# EAGLE library part ESP32-S3-DEVKITC-1-N32R16V (library ESP32-S3-DevKitC-1-N32R16V)
Multiprotocol Development Tools The ESP32-S3-DevKitC-1 is an entry-level development board equipped with ESP32-S3-WROOM-1, ESP32-S3-WROOM-1U, or ESP32-S3-WROOM-2, a general-purpose Wi-Fi + Bluetooth Low Energy MCU module that integrates complete Wi-Fi and Bluetooth Low Energy funct Source: Datasheet <https://docs.espressif.com/projects/esp-dev-kits/en/latest/esp32s3/esp-dev-kits-en-master-esp32s3.pdf>
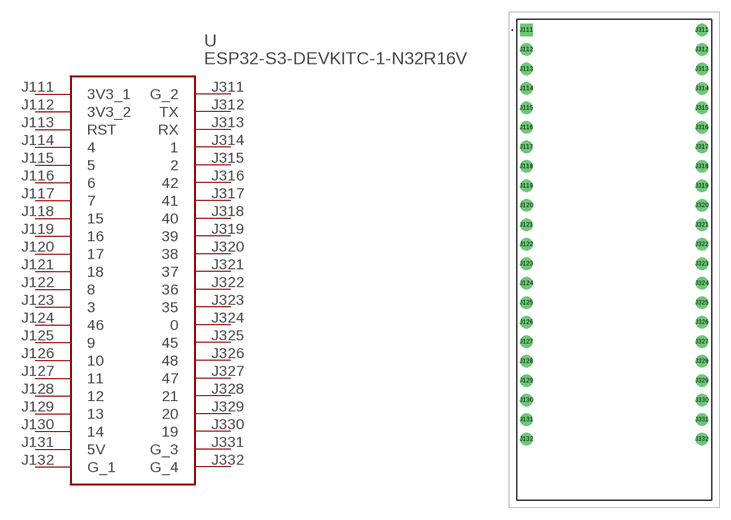
[diagram p0: symbol with the pads of ESP32S3DevKitC1N32R16V; footprint ESP32S3DevKitC1N32R16V]

Designator prefix U

## ESP32-S3-DEVKITC-1-N32R16V (Description: Multiprotocol Development Tools The ESP32-S3-DevKitC-1 is an entry-level development board equipped with ESP32-S3-WROOM-1, ESP32-S3-WROOM-1U, or ESP32-S3-WROOM-2, a general-purpose Wi-Fi + Bluetooth Low Energy MCU module that integrates complete Wi-Fi and Bluetooth Low Energy funct; Height: 5mm; Manufacturer_Name: Espressif Systems; Manufacturer_Part_Number: ESP32-S3-DevKitC-1-N32R16V; Mouser_Part_Number: 356-32S3DKTC1N32R16V; Mouser_Price-Stock: https://www.mouser.co.uk/ProductDetail/Espressif-Systems/ESP32-S3-DevKitC-1-N32R16V?qs=sqEgtWRSLJ3pTWIVKUeIew%3D%3D)  [ESP32S3DevKitC1N32R16V]
J111  3V3_1
J112  3V3_2
J113  RST
J114  4
J115  5
J116  6
J117  7
J118  15
J119  16
J120  17
J121  18
J122  8
J123  3
J124  46
J125  9
J126  10
J127  11
J128  12
J129  13
J130  14
J131  5V
J132  G_1
J311  G_2
J312  TX
J313  RX
J314  1
J315  2
J316  42
J317  41
J318  40
J319  39
J320  38
J321  37
J322  36
J323  35
J324  0
J325  45
J326  48
J327  47
J328  21
J329  20
J330  19
J331  G_3
J332  G_4

## Footprint ESP32S3DevKitC1N32R16V (pad centres in mm)
ESP32-S3-DevKitC-1-N32R16V-1
drill 1.11 pad 1.665 square: J111 0,0
drill 1.11 pad 1.665: J112 0,-2.54; J113 0,-5.08; J114 0,-7.62; J115 0,-10.16; J116 0,-12.7; J117 0,-15.24; J118 0,-17.78; J119 0,-20.32; J120 0,-22.86; J121 0,-25.4; J122 0,-27.94; J123 0,-30.48; J124 0,-33.02; J125 0,-35.56; J126 0,-38.1; J127 0,-40.64; J128 0,-43.18; J129 0,-45.72; J130 0,-48.26; J131 0,-50.8; J132 0,-53.34; J311 22.86,0; J312 22.86,-2.54; J313 22.86,-5.08; J314 22.86,-7.62; J315 22.86,-10.16; J316 22.86,-12.7; J317 22.86,-15.24; J318 22.86,-17.78; J319 22.86,-20.32; J320 22.86,-22.86; J321 22.86,-25.4; J322 22.86,-27.94; J323 22.86,-30.48; J324 22.86,-33.02; J325 22.86,-35.56; J326 22.86,-38.1; J327 22.86,-40.64; J328 22.86,-43.18; J329 22.86,-45.72; J330 22.86,-48.26; J331 22.86,-50.8; J332 22.86,-53.34